# Altium footprint library PMP41115.PcbLib: 53 footprints (part 3 of 4)
Each footprint in its own frame and in the unit in brackets; x right, y up, seen from the top. Pads: shape width x height; smd on the part's side, far side on the other; paste and mask are expansions set on the pad; w line width, h text height; cw(c..) or ccw(c..) is an arc to the next point about the centre after c.
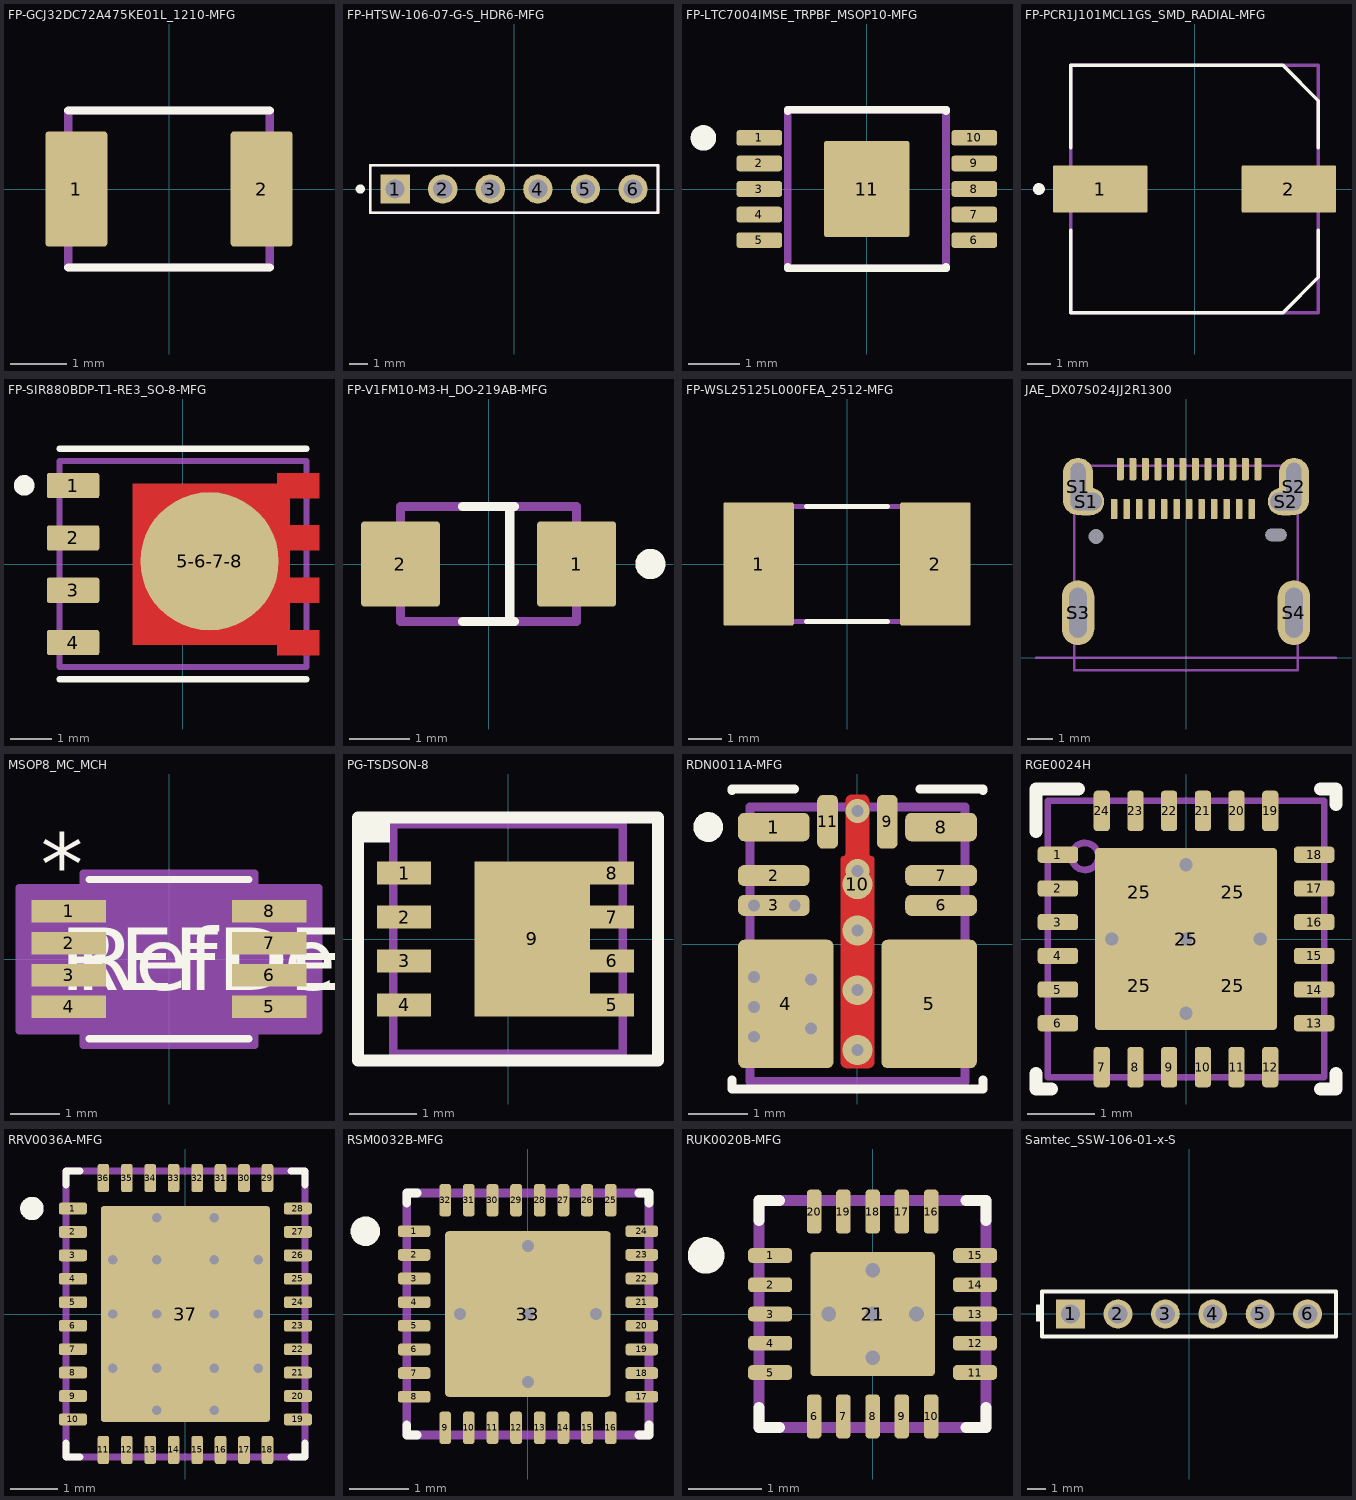
[diagram p2: the footprints below, top view; thin cyan lines are the x and y axes]

## FP-GCJ32DC72A475KE01L_1210-MFG [mm]
height 4.8
pads (2):
  rrect9% 1.1x2.05 smd paste+0 mask+0: 1(-1.65,0) 2(1.65,0)
Top Overlay:
  lines w0.15: -1.8,-1.4 1.8,-1.4 ; -1.8,1.4 1.8,1.4
Mechanical 5:
  lines w0.15: -1.8,-1.4 -1.8,1.4 1.8,1.4 1.8,-1.4 -1.8,-1.4
  text ".Designator" at 0.05,0.217 h0.5
3D body "Cap_GCJ32DC72A475KE01L_1210.STEP": height 2.3, standoff 0, extent -1.6,-1.25 1.6,1.25

## FP-HTSW-106-07-G-S_HDR6-MFG [mm]
height 10.287
pads (6):
  rrect6% 1.57x1.57 hole 1.02 paste-2539.97 mask+0: 1(-6.35,0)
  round 1.57 hole 1.02 paste-2539.97 mask+0: 2(-3.81,0) 3(-1.27,0) 4(1.27,0) 5(3.81,0) 6(6.35,0)
Top Overlay:
  circle w0.25: c-8.21,0 r0.125
  lines w0.15: -7.683,-1.27 -7.683,1.27 7.683,1.27 7.683,-1.27 -7.683,-1.27
Mechanical 5:
  lines w0.15: -7.683,-1.27 -7.683,1.27 7.683,1.27 7.683,-1.27 -7.683,-1.27
  text ".Designator" at 0.05,0.217 h0.5
3D body "Conn_HTSW-106-07-G-S_HDR6.STEP": height 0.25, standoff 0, extent -7.783,-1.37 7.783,1.37

## FP-LTC7004IMSE_TRPBF_MSOP10-MFG [mm]
height 4.8
pads (11):
  rrect33% 0.889x0.305 smd paste+0 mask+0: 1(-2.105,1) 2(-2.105,0.5) 3(-2.105,0) 4(-2.105,-0.5) 5(-2.105,-1) 6(2.105,-1) 7(2.105,-0.5) 8(2.105,0) 9(2.105,0.5) 10(2.105,1)
  rrect6% 1.68x1.88 smd paste+0 mask+0: 11(0,0)
Top Overlay:
  circle w0.25: c-3.2,1 r0.125
  lines w0.15: -1.551,-1.528 -1.551,-1.551 1.551,-1.551 1.551,-1.528 ; -1.551,1.528 -1.551,1.551 1.551,1.551 1.551,1.528
Mechanical 5:
  lines w0.15: -1.551,-1.551 1.551,-1.551 1.551,1.551 -1.551,1.551 -1.551,-1.551
  text ".Designator" at 0,0 h0.5
3D body "IC_LTC7004IMSE_TRPBF_MSOP10.STEP": height 0.25, standoff 0, extent -2.65,-1.803 2.65,1.803

## FP-PCR1J101MCL1GS_SMD_RADIAL-MFG [mm]
height 4.8
pads (2):
  rrect5% 4x2 smd paste+0 mask+0: 1(-4,0) 2(4,0)
Top Overlay:
  circle w0.25: c-6.6,0 r0.125
  lines w0.15: -5.25,-1.75 -5.25,-5.25 3.75,-5.25 5.25,-3.75 5.25,-1.75 ; -5.25,1.75 -5.25,5.25 3.75,5.25 5.25,3.75 5.25,1.75
Mechanical 5:
  lines w0.15: -5.25,-5.25 5.25,-5.25 5.25,5.25 -5.25,5.25 -5.25,-5.25
  text ".Designator" at 0,0 h0.5
3D body "Cap_PCR1J101MCL1GS_SMD_RADIAL.STEP": height 0.25, standoff 0, extent -6.25,-5.5 6.25,5.5

## FP-SIR880BDP-T1-RE3_SO-8-MFG [mil]
height 188.98
pads (5):
  rrect16% 50x24 smd paste+0 mask+0: 1(-105,75) 2(-105,25) 3(-105,-25) 4(-105,-75)
  round 132.13 smd paste+0 mask+0: 5-6-7-8(25.41,2.72)
Top Layer:
  region: -48,77 90,77 90,87 130,87 130,63 102,63 102,37 130,37 130,13 102,13 102,-13 130,-13 130,-37 102,-37 102,-63 130,-63 130,-87 90,-87 90,-77 -48,-77
Top Overlay:
  circle w9.84: c-151.77,75.19 r4.92
  lines w5.91: -117.91,-110.04 117.91,-110.04 ; -117.91,110.24 117.91,110.24
Mechanical 5:
  lines w5.91: -117.91,-98.43 117.91,-98.43 117.91,98.43 -117.91,98.43 -117.91,-98.43
  text ".Designator" at 1.97,8.53 h19.68
3D body "Trans_SIR880BDP-T1-RE3_SO-8.STEP": height 46.07, standoff 0, extent -120.41,-102.22 121.72,100.53

## FP-V1FM10-M3-H_DO-219AB-MFG [mm]
height 1.1
pads (2):
  rrect8% 1.3x1.4 smd paste+0 mask+0: 1(1.45,0) 2(-1.45,0)
Top Overlay:
  circle w0.25: c2.667,0 r0.125
  lines w0.15: -0.425,-0.95 0.425,-0.95 ; -0.425,0.95 0.425,0.95 ; 0.35,-0.87 0.35,0.87
Mechanical 5:
  lines w0.15: -1.45,-0.95 -1.45,0.95 1.45,0.95 1.45,-0.95 -1.45,-0.95
  text ".Designator" at 0,0 h0.5
3D body "Diode_V1FM10-M3-H_DO-219AB.STEP": height 1.08, standoff 0, extent -1.85,-0.9 1.85,0.9

## FP-WSL25125L000FEA_2512-MFG [mm]
height 4.8
pads (2):
  rrect5% 2.11x3.68 smd paste+0 mask+0: 1(-2.645,0) 2(2.645,0)
Top Overlay:
  lines w0.15: -1.215,-1.717 1.215,-1.717 ; -1.215,1.717 1.215,1.717
Mechanical 5:
  lines w0.15: -3.302,-1.717 -3.302,1.717 3.302,1.717 3.302,-1.717 -3.302,-1.717
  text ".Designator" at 0.05,0.217 h0.5
3D body "Res_WSL25125L000FEA_2512.STEP": height 0.25, standoff 0, extent -3.8,-1.94 3.8,1.94

## JAE_DX07S024JJ2R1300 [mm] "Receptacle, USB 3.1 Type C, R/A, SMT"
height 3.29
pads (32):
  rrect37% 0.27x0.9 smd: A1(-2.625,7.55) A2(-2.125,7.55) A3(-1.625,7.55) A4(-1.125,7.55) A5(-0.625,7.55) A6(-0.125,7.55) A7(0.375,7.55) A8(0.875,7.55) A9(1.375,7.55) A10(1.875,7.55) A11(2.375,7.55) A12(2.875,7.55)
  round 0.3 hole 0.6 unplated mask+0.102: ALIGN1(-3.6,4.85)
  rrect100% 0.55x0.3 hole 0.5 slot 0.85 at 0 deg unplated mask+0.102: ALIGN2(3.6,4.915)
  rrect37% 0.27x0.8 smd: B1(2.625,5.95) B2(2.125,5.95) B3(1.625,5.95) B4(1.125,5.95) B5(0.625,5.95) B6(0.125,5.95) B7(-0.375,5.95) B8(-0.875,5.95) B9(-1.375,5.95) B10(-1.875,5.95) B11(-2.375,5.95) B12(-2.875,5.95)
  rrect100% 1.2x2.3 hole 0.6 slot 1.9 at 90 deg: S1(-4.32,6.85) S2(4.32,6.85)
  rrect100% 1.45x1.1 hole 0.7 slot 1.25 at 0 deg: S1(-3.995,6.25) S2(3.995,6.25)
  rrect100% 1.3x2.6 hole 0.7 slot 2 at 90 deg: S3(-4.32,1.8) S4(4.32,1.8)
Mechanical 1:
  lines w0.1: -6,0 6,0
Mechanical 5:
  lines w0.1: -4.47,-0.5 -4.47,7.67 -3.47,7.67 3.47,7.67 4.47,7.67 4.47,-0.5 3.47,-0.5 -3.47,-0.5 -4.47,-0.5
  text ".Designator" at -1.8,4.336 h1.02
3D body "DX07S024JJ2R1300.stp": height 3.14, standoff -0.6, extent -4.47,-0.5 4.47,7.67

## MSOP8_MC_MCH [mil]
pads (8):
  rect 60x18 smd paste+0 mask+0: 1(-80.5,38.39) 2(-80.5,12.8) 3(-80.5,-12.8) 4(-80.5,-38.39) 5(80.5,-38.39) 6(80.5,-12.8) 7(80.5,12.8) 8(80.5,38.39)
Top Overlay:
  lines w6: -64,-64 64,-64 ; -64,64 64,64
  text "RefDes" at -75,-25 h50
  text "*" at -103,51.39 h50
  text "REFDES" at -87.5,-25 h50
Mechanical 13:
  lines w0: -12,59 ccw(c0,59) 12,59
  lines w1: -96.5,-46.39 -59,-46.39 -59,-30.39 -96.5,-30.39 -96.5,-46.39 ; -96.5,-20.8 -59,-20.8 -59,-4.8 -96.5,-4.8 -96.5,-20.8 ; -96.5,4.8 -59,4.8 -59,20.8 -96.5,20.8 -96.5,4.8 ; -96.5,30.39 -59,30.39 -59,46.39 -96.5,46.39 -96.5,30.39 ; -59,-59 -59,59 59,59 59,-59 -59,-59 ; 59,-46.39 96.5,-46.39 96.5,-30.39 59,-30.39 59,-46.39 ; 59,-20.8 96.5,-20.8 96.5,-4.8 59,-4.8 59,-20.8 ; 59,4.8 96.5,4.8 96.5,20.8 59,20.8 59,4.8 ; 59,30.39 96.5,30.39 96.5,46.39 59,46.39 59,30.39
  text "RefDes2" at -87.5,-25 h50
  text "*" at -56.5,6 h50
Mechanical 15:
  region: -69,-57.39 -120.5,-57.39 -120.5,57.39 -69,57.39 -69,69 69,69 69,57.39 120.5,57.39 120.5,-57.39 69,-57.39 69,-69 -69,-69
  lines w6: -120.5,-57.39 -69,-57.39 -69,-69 69,-69 69,-57.39 120.5,-57.39 120.5,57.39 69,57.39 69,69 -69,69 -69,57.39 -120.5,57.39 -120.5,-57.39
3D body "MSOP8_MC_MCH.step": height 43.11, standoff 0, extent -96.5,-59.02 96.5,59.02

## PG-TSDSON-8 [mm] "Infineon recommended land pattern"
height 1.1
pads (9):
  rect 0.8x0.34 smd: 1(-1.538,0.975) 2(-1.538,0.325) 3(-1.538,-0.325) 4(-1.538,-0.975)
  rect 0.65x0.34 smd: 5(1.538,-0.975) 6(1.538,-0.325) 7(1.538,0.325) 8(1.538,0.975)
  rect 1.71x2.29 smd: 9(0.358,0)
Top Overlay:
  rectangle: -2.212,1.425 -1.75,1.76
  lines w0.178: -2.22,-1.8 -2.22,0 -2.22,1.8 0.1,1.8 2.22,1.8 2.22,0 2.22,-1.8 0.1,-1.8 -2.22,-1.8
Mechanical 5:
  lines w0.127: -1.7,-1.7 1.7,-1.7 1.7,1.7 -1.7,1.7 -1.7,-1.7
  text ".Designator" at -1.538,-0.325 h0.76
3D body "PG-TSDSON-8.stp": height 1.1, standoff 0, extent -1.7,-1.7 1.7,1.7

## RDN0011A-MFG [mm]
pads (11):
  rrect42% 1.2x0.475 smd paste-1000 mask-1000: 1(-1.4,1.962) 8(1.4,1.962)
  rrect57% 1.2x0.35 smd paste-1000 mask-1000: 2(-1.4,1.15) 3(-1.4,0.65) 6(1.4,0.65) 7(1.4,1.15)
  rrect13% 1.6x2.15 smd paste-1000 mask-1000: 4(-1.2,-1) 5(1.2,-1)
  rrect57% 0.35x0.9 smd paste-1000 mask-1000: 9(0.5,2.05) 11(-0.5,2.05)
  round 0.504 smd paste-1000 mask-1000: 10(0,1.005)
via 0,-1.77 diameter 0.5 hole 0.2
via 0,-0.77 diameter 0.5 hole 0.2
via 0,0.23 diameter 0.5 hole 0.2
via 0,1.23 diameter 0.4 hole 0.2
via 0,2.23 diameter 0.4 hole 0.2
via -1.73,-0.55 diameter 0.5 hole 0.2
via -1.73,-1.05 diameter 0.5 hole 0.2
via -1.73,-1.55 diameter 0.5 hole 0.2
via -0.78,-0.59 diameter 0.5 hole 0.2
via -0.78,-1.41 diameter 0.5 hole 0.2
via -1.73,0.65 diameter 0.35 hole 0.2
via -1.05,0.65 diameter 0.35 hole 0.2
Top Layer:
  region: -0.2,2.4 -0.2,2.42 -0.185,2.457 -0.157,2.485 -0.12,2.5 -0.1,2.5 0.1,2.5 0.12,2.5 0.157,2.485 0.185,2.457 0.2,2.42 0.2,2.4 0.2,1.515 0.201,1.507 0.207,1.493 0.218,1.482 0.232,1.476 0.24,1.475 0.248,1.475 0.263,1.469 0.274,1.458 0.28,1.443 0.28,1.435 0.28,-1.975 0.28,-1.995 0.265,-2.032 0.237,-2.06 0.2,-2.075 0.18,-2.075 -0.18,-2.075 -0.2,-2.075 -0.237,-2.06 -0.265,-2.032 -0.28,-1.995 -0.28,-1.975 -0.28,1.435 -0.28,1.443 -0.274,1.458 -0.263,1.469 -0.248,1.475 -0.24,1.475 -0.232,1.476 -0.218,1.482 -0.207,1.493 -0.201,1.507 -0.2,1.515
Top Overlay:
  circle w0.25: c-2.5,1.962 r0.125
  lines w0.15: -2.1,-2.275 -2.1,-2.425 2.1,-2.425 2.1,-2.275 ; -2.1,2.575 -2.1,2.6 -1.05,2.6 ; 1.05,2.6 2.1,2.6 2.1,2.575
Top Paste:
  drawing of 23 lines, arcs and shapes, not listed
Top Solder:
  drawing of 11 lines, arcs and shapes, not listed
Mechanical 5:
  lines w0.15: -1.8,-2.3 -1.8,2.3 1.8,2.3 1.8,-2.3 -1.8,-2.3
  text ".Designator" at 0.05,0.317 h0.5
3D body "IC_TPSM365R6RDNR_QFN-FCMOD11.STEP": height 2.1, standoff 0, extent -1.75,-2.25 1.75,2.25

## RGE0024H [mm] "QFN, 24-Leads, Body 4x4mm, Pitch 0.5mm, Thermal Pad 2.7x2.7mm, TI Recommended"
height 1
pads (29):
  rrect42% 0.6x0.24 smd: 1(-1.9,1.25) 2(-1.9,0.75) 3(-1.9,0.25) 4(-1.9,-0.25) 5(-1.9,-0.75) 6(-1.9,-1.25) 13(1.9,-1.25) 14(1.9,-0.75) 15(1.9,-0.25) 16(1.9,0.25) 17(1.9,0.75) 18(1.9,1.25)
  rrect42% 0.24x0.6 smd: 7(-1.25,-1.9) 8(-0.75,-1.9) 9(-0.25,-1.9) 10(0.25,-1.9) 11(0.75,-1.9) 12(1.25,-1.9) 19(1.25,1.9) 20(0.75,1.9) 21(0.25,1.9) 22(-0.25,1.9) 23(-0.75,1.9) 24(-1.25,1.9)
  rrect50% 1.19x1.19 on Top Paste: 25(-0.695,-0.695) 25(-0.695,0.695) 25(0.695,-0.695) 25(0.695,0.695)
  rrect4% 2.7x2.7 smd paste-1.35: 25(0,0)
via 0,-1.1 diameter 0.5 hole 0.2
via 1.1,0 diameter 0.5 hole 0.2
via 0,0 diameter 0.5 hole 0.2
via -1.1,0 diameter 0.5 hole 0.2
via 0,1.1 diameter 0.5 hole 0.2
Top Overlay:
  lines w0.2: -2.225,-2 -2.225,-2.225 -2,-2.225 ; -2.225,1.6 -2.225,2.225 -1.6,2.225 ; 2,-2.225 2.225,-2.225 2.225,-2 ; 2,2.225 2.225,2.225 2.225,2
Mechanical 5:
  circle w0.1: c-1.5,1.225 r0.2
  lines w0.1: -2.05,-2.05 -2.05,2.05 2.05,2.05 2.05,-2.05 -2.05,-2.05
  text ".Designator" at -1.9,-0.7 h1.8
3D body: height 1, standoff 0, extent -2.075,-2.075 2.075,2.075
3D body: height 1.01, standoff 0.5, extent -1.699,1.026 -1.301,1.424

## RRV0036A-MFG [mm]
height 4.8
pads (37):
  rrect40% 0.6x0.25 smd paste+0 mask+0: 1(-2.4,2.25) 2(-2.4,1.75) 3(-2.4,1.25) 4(-2.4,0.75) 5(-2.4,0.25) 6(-2.4,-0.25) 7(-2.4,-0.75) 8(-2.4,-1.25) 9(-2.4,-1.75) 10(-2.4,-2.25) 19(2.4,-2.25) 20(2.4,-1.75) 21(2.4,-1.25) 22(2.4,-0.75) 23(2.4,-0.25) 24(2.4,0.25) 25(2.4,0.75) 26(2.4,1.25) 27(2.4,1.75) 28(2.4,2.25)
  rrect40% 0.25x0.6 smd paste+0 mask+0: 11(-1.75,-2.9) 12(-1.25,-2.9) 13(-0.75,-2.9) 14(-0.25,-2.9) 15(0.25,-2.9) 16(0.75,-2.9) 17(1.25,-2.9) 18(1.75,-2.9) 29(1.75,2.9) 30(1.25,2.9) 31(0.75,2.9) 32(0.25,2.9) 33(-0.25,2.9) 34(-0.75,2.9) 35(-1.25,2.9) 36(-1.75,2.9)
  rrect3% 3.6x4.6 smd paste-1000 mask+0: 37(0,0)
via 0.615,-2.05 diameter 0.5 hole 0.2
via -0.615,-2.05 diameter 0.5 hole 0.2
via 0.615,2.05 diameter 0.5 hole 0.2
via -0.615,2.05 diameter 0.5 hole 0.2
via 0.615,0 diameter 0.5 hole 0.2
via -0.615,0 diameter 0.5 hole 0.2
via 0.615,-1.16 diameter 0.5 hole 0.2
via -0.615,-1.16 diameter 0.5 hole 0.2
via 0.615,1.16 diameter 0.5 hole 0.2
via -0.615,1.16 diameter 0.5 hole 0.2
via 1.55,1.16 diameter 0.5 hole 0.2
via -1.55,1.16 diameter 0.5 hole 0.2
via 1.55,-1.16 diameter 0.5 hole 0.2
via -1.55,-1.16 diameter 0.5 hole 0.2
via 1.55,0 diameter 0.5 hole 0.2
via -1.55,0 diameter 0.5 hole 0.2
Top Overlay:
  circle w0.25: c-3.275,2.25 r0.125
  lines w0.15: -2.55,-2.75 -2.55,-3.05 -2.25,-3.05 ; -2.55,2.75 -2.55,3.05 -2.25,3.05 ; 2.25,-3.05 2.55,-3.05 2.55,-2.75 ; 2.25,3.05 2.55,3.05 2.55,2.75
Top Paste:
  drawing of 12 lines, arcs and shapes, not listed
Mechanical 5:
  lines w0.15: -2.55,-3.05 -2.55,3.05 2.55,3.05 2.55,-3.05 -2.55,-3.05
  text ".Designator" at 0.05,0.217 h0.5
3D body "IC_BQ25751RRVT_VQFN36.STEP": height 0.25, standoff 0, extent -2.8,-3.3 2.8,3.3

## RSM0032B-MFG [mm]
height 4.8
pads (33):
  rrect50% 0.55x0.2 smd paste+0 mask+0: 1(-1.925,1.4) 2(-1.925,1) 3(-1.925,0.6) 4(-1.925,0.2) 5(-1.925,-0.2) 6(-1.925,-0.6) 7(-1.925,-1) 8(-1.925,-1.4) 17(1.925,-1.4) 18(1.925,-1) 19(1.925,-0.6) 20(1.925,-0.2) 21(1.925,0.2) 22(1.925,0.6) 23(1.925,1) 24(1.925,1.4)
  rrect50% 0.2x0.55 smd paste+0 mask+0: 9(-1.4,-1.925) 10(-1,-1.925) 11(-0.6,-1.925) 12(-0.2,-1.925) 13(0.2,-1.925) 14(0.6,-1.925) 15(1,-1.925) 16(1.4,-1.925) 25(1.4,1.925) 26(1,1.925) 27(0.6,1.925) 28(0.2,1.925) 29(-0.2,1.925) 30(-0.6,1.925) 31(-1,1.925) 32(-1.4,1.925)
  rrect4% 2.8x2.8 smd paste-1000 mask+0: 33(0,0)
via 0,-1.15 diameter 0.5 hole 0.2
via 0,1.15 diameter 0.5 hole 0.2
via 1.15,0 diameter 0.5 hole 0.2
via 0,0 diameter 0.5 hole 0.2
via -1.15,0 diameter 0.5 hole 0.2
Top Overlay:
  circle w0.25: c-2.75,1.4 r0.125
  lines w0.15: -2.05,-1.875 -2.05,-2.05 -1.875,-2.05 ; -2.05,1.875 -2.05,2.05 -1.875,2.05 ; 1.875,-2.05 2.05,-2.05 2.05,-1.875 ; 1.875,2.05 2.05,2.05 2.05,1.875
Top Paste:
  region: 1.33,-0.15 1.33,-1.28 1.33,-1.29 1.322,-1.308 1.308,-1.322 1.29,-1.33 1.28,-1.33 0.15,-1.33 0.14,-1.33 0.122,-1.322 0.108,-1.308 0.1,-1.29 0.1,-1.28 0.1,-0.15 0.1,-0.14 0.108,-0.122 0.122,-0.108 0.14,-0.1 0.15,-0.1 1.28,-0.1 1.29,-0.1 1.308,-0.108 1.322,-0.122 1.33,-0.14
  region: -1.28,-1.33 -1.29,-1.33 -1.308,-1.322 -1.322,-1.308 -1.33,-1.29 -1.33,-1.28 -1.33,-0.15 -1.33,-0.14 -1.322,-0.122 -1.308,-0.108 -1.29,-0.1 -1.28,-0.1 -0.15,-0.1 -0.14,-0.1 -0.122,-0.108 -0.108,-0.122 -0.1,-0.14 -0.1,-0.15 -0.1,-1.28 -0.1,-1.29 -0.108,-1.308 -0.122,-1.322 -0.14,-1.33 -0.15,-1.33
  region: 0.1,0.15 0.1,1.28 0.1,1.29 0.108,1.308 0.122,1.322 0.14,1.33 0.15,1.33 1.28,1.33 1.29,1.33 1.308,1.322 1.322,1.308 1.33,1.29 1.33,1.28 1.33,0.15 1.33,0.14 1.322,0.122 1.308,0.108 1.29,0.1 1.28,0.1 0.15,0.1 0.14,0.1 0.122,0.108 0.108,0.122 0.1,0.14
  region: -0.1,0.15 -0.1,0.14 -0.108,0.122 -0.122,0.108 -0.14,0.1 -0.15,0.1 -1.28,0.1 -1.29,0.1 -1.308,0.108 -1.322,0.122 -1.33,0.14 -1.33,0.15 -1.33,1.28 -1.33,1.29 -1.322,1.308 -1.308,1.322 -1.29,1.33 -1.28,1.33 -0.15,1.33 -0.14,1.33 -0.122,1.322 -0.108,1.308 -0.1,1.29 -0.1,1.28
Mechanical 5:
  lines w0.15: -2.05,-2.05 -2.05,2.05 2.05,2.05 2.05,-2.05 -2.05,-2.05
  text ".Designator" at 0.05,0.217 h0.5
3D body "IC_TPS26750RSMR_VQFN32.STEP": height 0.25, standoff 0, extent -2.3,-2.3 2.3,2.3

## RUK0020B-MFG [mm]
height 4.8
pads (21):
  rrect50% 0.6x0.2 smd paste+0 mask+0: 1(-1.4,0.8) 2(-1.4,0.4) 3(-1.4,0) 4(-1.4,-0.4) 5(-1.4,-0.8) 11(1.4,-0.8) 12(1.4,-0.4) 13(1.4,0) 14(1.4,0.4) 15(1.4,0.8)
  rrect50% 0.2x0.6 smd paste+0 mask+0: 6(-0.8,-1.4) 7(-0.4,-1.4) 8(0,-1.4) 9(0.4,-1.4) 10(0.8,-1.4) 16(0.8,1.4) 17(0.4,1.4) 18(0,1.4) 19(-0.4,1.4) 20(-0.8,1.4)
  rrect6% 1.7x1.7 smd paste-1000 mask+0: 21(0,0)
via 0,0.6 diameter 0.5 hole 0.2
via 0,-0.6 diameter 0.5 hole 0.2
via 0.6,0 diameter 0.5 hole 0.2
via 0,0 diameter 0.5 hole 0.2
via -0.6,0 diameter 0.5 hole 0.2
Top Overlay:
  circle w0.25: c-2.275,0.8 r0.125
  lines w0.15: -1.55,-1.275 -1.55,-1.55 -1.275,-1.55 ; -1.55,1.275 -1.55,1.55 -1.275,1.55 ; 1.275,-1.55 1.55,-1.55 1.55,-1.275 ; 1.275,1.55 1.55,1.55 1.55,1.275
Top Paste:
  region: 0.095,-0.145 0.095,-0.135 0.103,-0.117 0.117,-0.103 0.135,-0.095 0.145,-0.095 0.795,-0.095 0.805,-0.095 0.823,-0.103 0.837,-0.117 0.845,-0.135 0.845,-0.145 0.845,-0.795 0.845,-0.805 0.837,-0.823 0.823,-0.837 0.805,-0.845 0.795,-0.845 0.145,-0.845 0.135,-0.845 0.117,-0.837 0.103,-0.823 0.095,-0.805 0.095,-0.795
  region: -0.795,-0.845 -0.805,-0.845 -0.823,-0.837 -0.837,-0.823 -0.845,-0.805 -0.845,-0.795 -0.845,-0.145 -0.845,-0.135 -0.837,-0.117 -0.823,-0.103 -0.805,-0.095 -0.795,-0.095 -0.145,-0.095 -0.135,-0.095 -0.117,-0.103 -0.103,-0.117 -0.095,-0.135 -0.095,-0.145 -0.095,-0.795 -0.095,-0.805 -0.103,-0.823 -0.117,-0.837 -0.135,-0.845 -0.145,-0.845
  region: 0.095,0.795 0.095,0.805 0.103,0.823 0.117,0.837 0.135,0.845 0.145,0.845 0.795,0.845 0.805,0.845 0.823,0.837 0.837,0.823 0.845,0.805 0.845,0.795 0.845,0.145 0.845,0.135 0.837,0.117 0.823,0.103 0.805,0.095 0.795,0.095 0.145,0.095 0.135,0.095 0.117,0.103 0.103,0.117 0.095,0.135 0.095,0.145
  region: -0.145,0.845 -0.135,0.845 -0.117,0.837 -0.103,0.823 -0.095,0.805 -0.095,0.795 -0.095,0.145 -0.095,0.135 -0.103,0.117 -0.117,0.103 -0.135,0.095 -0.145,0.095 -0.795,0.095 -0.805,0.095 -0.823,0.103 -0.837,0.117 -0.845,0.135 -0.845,0.145 -0.845,0.795 -0.845,0.805 -0.837,0.823 -0.823,0.837 -0.805,0.845 -0.795,0.845
Mechanical 5:
  lines w0.15: -1.55,-1.55 -1.55,1.55 1.55,1.55 1.55,-1.55 -1.55,-1.55
  text ".Designator" at 0,0 h0.5
3D body "IC_TPD4S480RUKR_WQFN20.STEP": height 0.25, standoff 0, extent -1.8,-1.8 1.8,1.8

## Samtec_SSW-106-01-x-S [mm] "Receptacle, 6x1, 2.54mm, TH"
height 8.64
pads (6):
  rect 1.55x1.55 hole 1.04: 1(-6.35,0)
  round 1.55 hole 1.04: 2(-3.81,0) 3(-1.27,0) 4(1.27,0) 5(3.81,0) 6(6.35,0)
Top Overlay:
  rectangle: -8.2,-0.4 -7.9,0.5
  lines w0.2: -7.874,-1.207 7.874,-1.207 7.874,1.206 -7.874,1.206 -7.874,-1.207
Mechanical 5:
  lines w0.1: -7.874,-1.207 -7.874,1.206 7.874,1.206 7.874,-1.207 -7.874,-1.207
  text ".Designator" at -1.524,-0.508 h1.02
3D body "SSW-106-01-T-S.stp": height 8.51, standoff -2.64, extent -7.874,-1.207 7.874,1.207